# EAGLE library part OPA2227P (library OPA2227P)
Texas Instruments OPA2227P, Dual Op Amp, 8MHz, 8-Pin PDIP Source: Datasheet <http://www.ti.com/lit/gpn/opa2227>
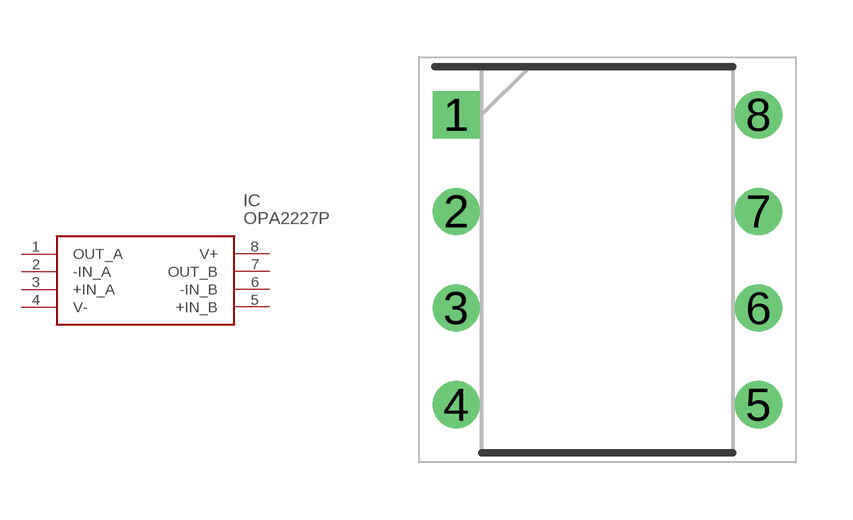
[diagram p0: symbol with the pads of DIP794W53P254L959H508Q8N; footprint DIP794W53P254L959H508Q8N]

Designator prefix IC

## OPA2227P (DESCRIPTION: Texas Instruments OPA2227P, Dual Op Amp, 8MHz, 8-Pin PDIP; HEIGHT: 5.08mm; MANUFACTURER_NAME: Texas Instruments; MANUFACTURER_PART_NUMBER: OPA2227P; MOUSER_PART_NUMBER: 595-OPA2227P; MOUSER_PRICE-STOCK: https://www.mouser.co.uk/ProductDetail/Texas-Instruments/OPA2227P?qs=7nS3%252BbEUL6tYg9YKNOsaXw%3D%3D)  [DIP794W53P254L959H508Q8N]
1  OUT_A
2  -IN_A
3  +IN_A
4  V-
5  +IN_B
6  -IN_B
7  OUT_B
8  V+

## Footprint DIP794W53P254L959H508Q8N (pad centres in mm)
p(r-pdip-t8)
drill 0.73 pad 1.13 square: 1 -3.97,3.81
drill 0.73 pad 1.13: 2 -3.97,1.27; 3 -3.97,-1.27; 4 -3.97,-3.81; 5 3.97,-3.81; 6 3.97,-1.27; 7 3.97,1.27; 8 3.97,3.81